# Altium integrated library Brian_Pari.IntLib: 123 symbols (part 2 of 4)
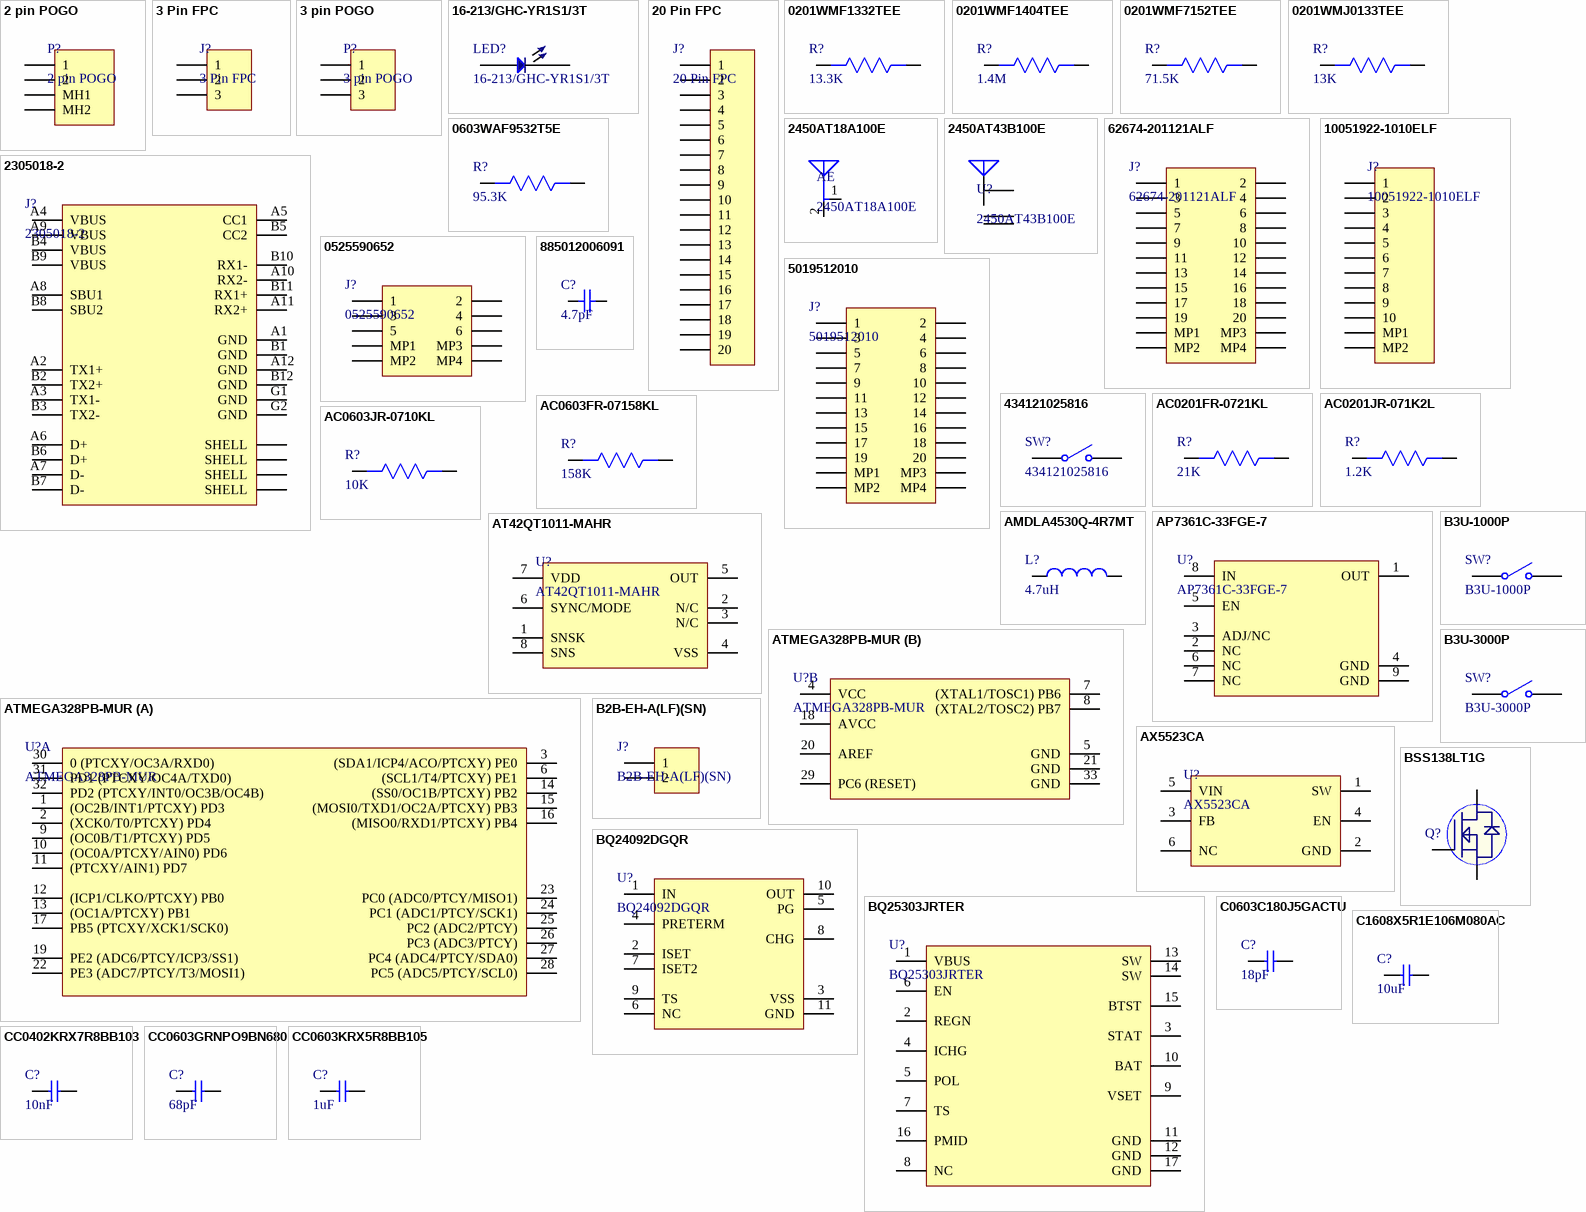
[diagram p4: symbols 2 pin POGO to CC0603KRX5R8BB105]

## CC0603GRNPO9BN680
designator C?, comment 68pF
CAP CER 68PF 50V NPO 0603; Manufacturer: Yageo; Manufacturer Part Number: CC0603GRNPO9BN680; Tolerance: 2%; Dielectric: C0G; Dissipation Factor: 0.1%; Supplier 1: Digi-Key; RoHS: Yes; Category: Ceramic Capacitors; Stock 1: 2385; Pricing 1: 1=0.13000, 10=0.09200, 50=0.05220, 100=0.04320, 500=0.03030, 1000=0.02509 (USD); Mount: Surface Mount; Case/Package: 0603; Case Code (Imperial): 0603; Case Code (Metric): 1608; Min Operating Temperature: -55°C; Max Operating Temperature: 125°C; Capacitance: 68pF; Voltage Rating: 50V; Packaging: Tape and Reel; Voltage Rating (DC): 50V; Termination: SMD/SMT; Resistor Type: Ceramic; Series: CC; Length: 1.6mm; Width: 0.8mm; Height: 0.8mm; Thickness: 0.035inch; Depth: 0.8mm; Radiation Hardening: No; Lead Free: Lead Free; RoHS Compliant: Yes; ComponentLink1URL: https://datasheet.ciiva.com/16623/upy-gp-np0-16v-to-50v-8-16623957.pdf?src-supplier=Avnet+Europe; ComponentLink1Description: https://datasheet.ciiva.com/16623/upy-gp-np0-16v-to-50v-8-16623957.pdf?src-supplier=Avnet+Europe; ComponentLink2URL: https://datasheet.ciiva.com/5427/upy-gp-np0-16v-to-50v-8-5427702.pdf?src-supplier=Mouser; ComponentLink2Description: https://datasheet.ciiva.com/5427/upy-gp-np0-16v-to-50v-8-5427702.pdf?src-supplier=Mouser; ComponentLink3URL: https://datasheet.ciiva.com/11587/upy-gp-np0-16v-to-50v-8-11587318.pdf?src-supplier=Avnet; ComponentLink3Description: https://datasheet.ciiva.com/11587/upy-gp-np0-16v-to-50v-8-11587318.pdf?src-supplier=Avnet; Supplier Part Number 1: 311-3938-1-ND
footprint Cap0603
pins: 1, 2

## CC0603KRX5R8BB105
designator C?, comment 1uF
CAP CER 1UF 25V X5R 0603; Manufacturer: Yageo; Manufacturer Part Number: CC0603KRX5R8BB105; Tolerance: 10%; Supplier 1: Digi-Key; Stock 1: 459947; Pricing 1: 1=0.1, 10=0.076, 100=0.0337, 500=0.0241, 1000=0.01894 (USD); Mount: Surface Mount; Case/Package: 0603; Number of Pins: 2; Case Code (Metric): 1608; Case Code (Imperial): 0603; Min Operating Temperature: -55°C; Max Operating Temperature: 85°C; Capacitance: 1uF; Dielectric: X5R; Package Quantity: 1; Voltage Rating: 25V; Packaging: Tape and Reel; Termination: SMD/SMT; Voltage Rating (DC): 25V; Length: 1.6mm; Height: 0.8mm; Width: 0.031inch; Thickness: 0.035inch; Depth: 0.8mm; Radiation Hardening: No; REACH SVHC: No SVHC; Lead Free: Lead Free; Halogen Free: Halogen Free; ComponentLink1URL: http://www.yageo.com/documents/recent/UPY-GPHC_X5R_4V-to-50V_25.pdf?src-supplier=Digi-Key; ComponentLink1Description: http://www.yageo.com/documents/recent/UPY-GPHC_X5R_4V-to-50V_25.pdf?src-supplier=Digi-Key; ComponentLink2URL: http://www.yageo.com/documents/recent/UPY-GPHC_X5R_4V-to-50V_12.pdf?src-supplier=Avnet+Europe; ComponentLink2Description: http://www.yageo.com/documents/recent/UPY-GPHC_X5R_4V-to-50V_12.pdf?src-supplier=Avnet+Europe; ComponentLink3URL: http://www.farnell.com/datasheets/1525783.pdf?src-supplier=Element14; ComponentLink3Description: http://www.farnell.com/datasheets/1525783.pdf?src-supplier=Element14; ComponentLink4URL: http://www.yageo.com/documents/recent/UPY-GPHC_X5R_4V-to-50V_12.pdf?src-supplier=Avnet; ComponentLink4Description: http://www.yageo.com/documents/recent/UPY-GPHC_X5R_4V-to-50V_12.pdf?src-supplier=Avnet; Supplier Part Number 1: 311-1445-1-ND
footprint Cap0603
pins: 1, 2

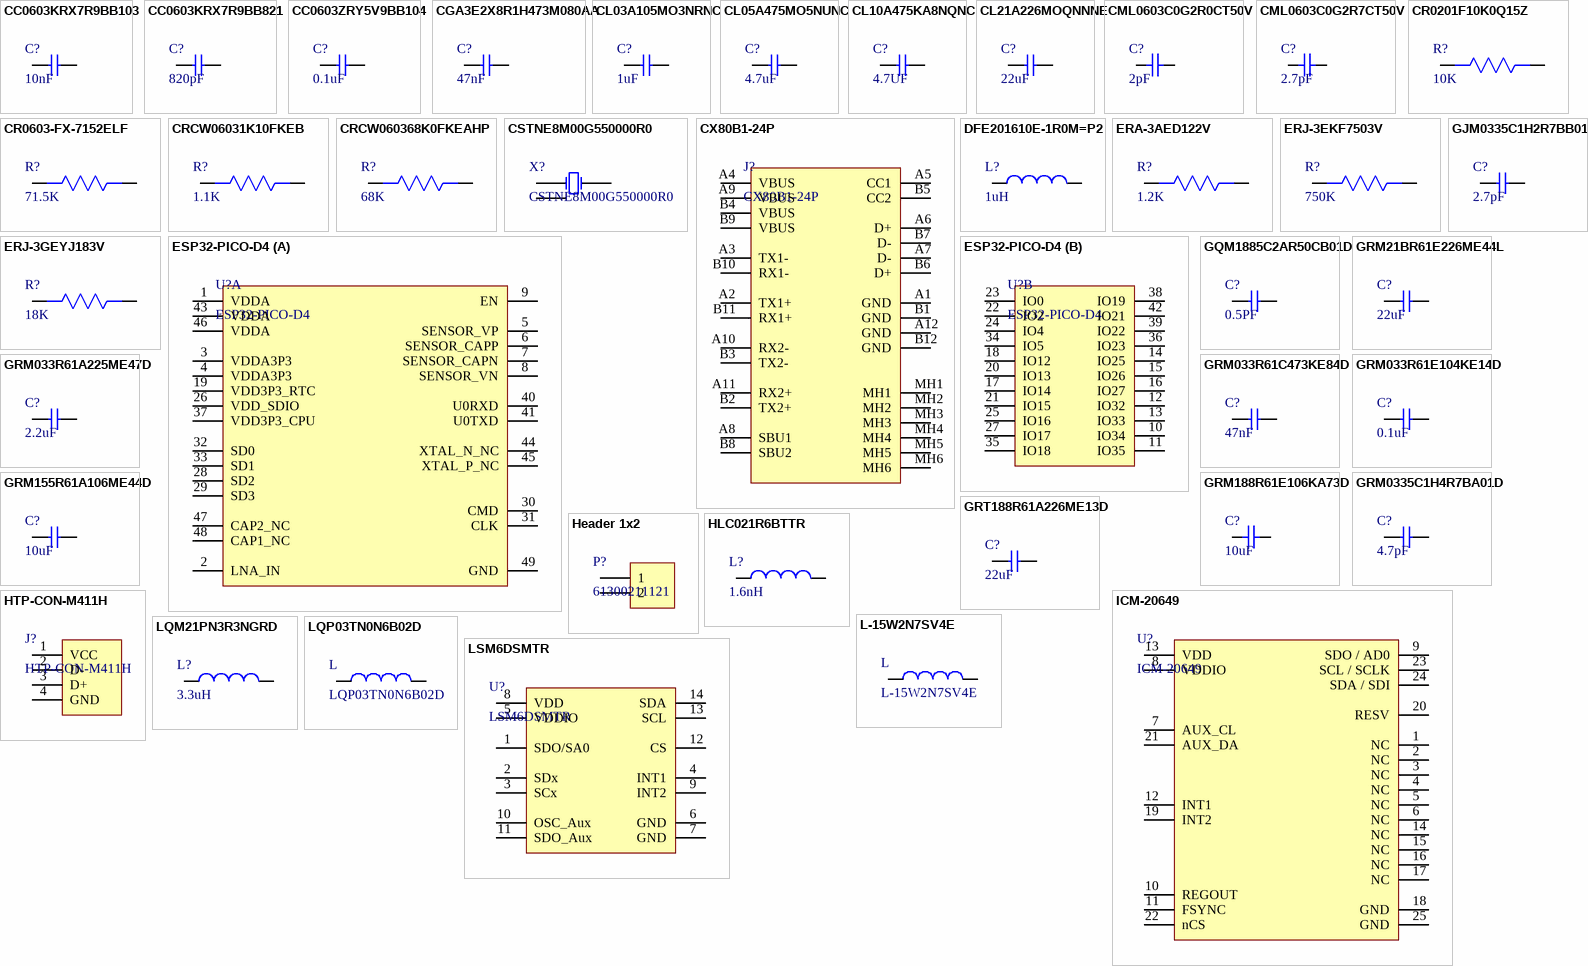
[diagram p1: symbols CC0603KRX7R9BB103 to LSM6DSMTR]

## CC0603KRX7R9BB103
designator C?, comment 10nF
CAP CER 10000PF 50V X7R 0603; Manufacturer: Yageo; Manufacturer Part Number: CC0603KRX7R9BB103; Material: Ceramic; Tolerance: 10%; Insulation Resistance: 100GR; Supplier 1: Digi-Key; Stock 1: 3223922; Pricing 1: 1=0.1, 10=0.041, 100=0.0181, 500=0.01294, 1000=0.01016 (USD); Mount: Surface Mount; Case/Package: 0603; Number of Pins: 2; Case Code (Metric): 1608; Case Code (Imperial): 0603; Min Operating Temperature: -55°C; Max Operating Temperature: 125°C; Capacitance: 10nF; Dielectric: X7R; Voltage: 50V; Packaging: Tape and Reel; Voltage Rating: 50V; Voltage Rating (DC): 50V; Package Quantity: 1; Termination: SMD/SMT; Composition: Ceramic; Length: 1.6mm; Height: 0.8mm; Width: 0.031inch; Thickness: 0.035inch; Depth: 0.8mm; Radiation Hardening: No; REACH SVHC: No SVHC; Lead Free: Lead Free; Halogen Free: Halogen Free; ComponentLink1URL: http://www.farnell.com/datasheets/2167236.pdf?src-supplier=Element14; ComponentLink1Description: http://www.farnell.com/datasheets/2167236.pdf?src-supplier=Element14; ComponentLink2URL: http://www.yageo.com/documents/recent/UPY-GPHC_X7R_6.3V-to-50V_18.pdf?src-supplier=Digi-Key; ComponentLink2Description: http://www.yageo.com/documents/recent/UPY-GPHC_X7R_6.3V-to-50V_18.pdf?src-supplier=Digi-Key; ComponentLink3URL: http://www.farnell.com/datasheets/2167236.pdf?src-supplier=Mouser; ComponentLink3Description: http://www.farnell.com/datasheets/2167236.pdf?src-supplier=Mouser; ComponentLink4URL: http://www.farnell.com/datasheets/70765.pdf?src-supplier=Element14; ComponentLink4Description: http://www.farnell.com/datasheets/70765.pdf?src-supplier=Element14; ComponentLink5URL: http://www.yageo.com/documents/recent/UPY-GPHC_X7R_6.3V-to-50V_8.pdf?src-supplier=Avnet+Europe; ComponentLink5Description: http://www.yageo.com/documents/recent/UPY-GPHC_X7R_6.3V-to-50V_8.pdf?src-supplier=Avnet+Europe; ComponentLink6URL: http://www.farnell.com/datasheets/1489800.pdf?src-supplier=Element14; ComponentLink6Description: http://www.farnell.com/datasheets/1489800.pdf?src-supplier=Element14; ComponentLink7URL: https://www.verical.com/server-webapp/html/getDatasheet?partID=403582&src-supplier=Verical; ComponentLink7Description: https://www.verical.com/server-webapp/html/getDatasheet?partID=403582&src-supplier=Verical; Supplier Part Number 1: 311-1085-1-ND
footprint Cap0603
pins: 1, 2

## CC0603KRX7R9BB821
designator C?, comment 820pF
CAP CER 820PF 50V X7R 0603; Manufacturer: Yageo; Manufacturer Part Number: CC0603KRX7R9BB821; Dielectric Material: Ceramic; Tolerance: 10%; Insulation Resistance: 10GR; Dissipation Factor: 2.5%; Supplier 1: Digi-Key; RoHS: Yes; Category: Ceramic Capacitors; Stock 1: 3528; Pricing 1: 1=0.10000, 10=0.04900, 50=0.02680, 100=0.02190, 500=0.01566, 1000=0.01230 (USD); Mount: Surface Mount; Case/Package: 0603; Case Code (Metric): 1608; Case Code (Imperial): 0603; Min Operating Temperature: -55°C; Max Operating Temperature: 125°C; Capacitance: 820pF; Dielectric: X7R; Packaging: Tape and Reel; Package Quantity: 1; Voltage Rating: 50V; Voltage Rating (DC): 50V; Termination: SMD/SMT; Resistor Type: Ceramic; Voltage: 50V; Series: CC; Construction: Flat; Length: 1.6mm; Width: 0.031inch; Height: 0.8mm; Thickness: 0.035inch; Depth: 0.8mm; Radiation Hardening: No; REACH SVHC: Unknown; Lead Free: Lead Free; Halogen Free: Halogen Free; RoHS Compliant: Yes; ComponentLink1URL: https://datasheet.ciiva.com/26862/getdatasheetpartid-315913-26862865.pdf?src-supplier=Verical; ComponentLink1Description: https://datasheet.ciiva.com/26862/getdatasheetpartid-315913-26862865.pdf?src-supplier=Verical; ComponentLink2URL: https://datasheet.ciiva.com/160/mlccorderingcode-160723.pdf?src-supplier=Digi-Key; ComponentLink2Description: https://datasheet.ciiva.com/160/mlccorderingcode-160723.pdf?src-supplier=Digi-Key; ComponentLink3URL: https://datasheet.ciiva.com/160/mlccorderingcode-160724.pdf?src-supplier=Digi-Key; ComponentLink3Description: https://datasheet.ciiva.com/160/mlccorderingcode-160724.pdf?src-supplier=Digi-Key; ComponentLink4URL: https://datasheet.ciiva.com/160/mlccorderingcode-160725.pdf?src-supplier=Digi-Key; ComponentLink4Description: https://datasheet.ciiva.com/160/mlccorderingcode-160725.pdf?src-supplier=Digi-Key; ComponentLink5URL: https://datasheet.ciiva.com/11465/upy-gphc-x7r-6-3v-to-50v-8-11465274.pdf?src-supplier=Avnet; ComponentLink5Description: https://datasheet.ciiva.com/11465/upy-gphc-x7r-6-3v-to-50v-8-11465274.pdf?src-supplier=Avnet; ComponentLink6URL: https://datasheet.ciiva.com/8033/1489800-8033883.pdf?src-supplier=Element14; ComponentLink6Description: https://datasheet.ciiva.com/8033/1489800-8033883.pdf?src-supplier=Element14; ComponentLink7URL: https://datasheet.ciiva.com/17434/upy-gphc-x7r-6-3v-to-50v-8-17434491.pdf?src-supplier=Avnet+Europe; ComponentLink7Description: https://datasheet.ciiva.com/17434/upy-gphc-x7r-6-3v-to-50v-8-17434491.pdf?src-supplier=Avnet+Europe; ComponentLink8URL: https://datasheet.ciiva.com/13210/upy-gphc-x7r-6-3v-to-50v-8-12304-13210396.pdf?src-supplier=Mouser; ComponentLink8Description: https://datasheet.ciiva.com/13210/upy-gphc-x7r-6-3v-to-50v-8-12304-13210396.pdf?src-supplier=Mouser; ComponentLink9URL: https://datasheet.ciiva.com/8033/1489800-8033885.pdf?src-supplier=Element14; ComponentLink9Description: https://datasheet.ciiva.com/8033/1489800-8033885.pdf?src-supplier=Element14; Supplier Part Number 1: 311-1189-1-ND
footprint Cap0603
pins: 1, 2

## CC0603ZRY5V9BB104
designator C?, comment 0.1uF
CAP CER 0.1UF 50V Y5V 0603; Manufacturer: Yageo; Manufacturer Part Number: CC0603ZRY5V9BB104; Capacitance: 100nF; Tolerance: 80%; Supplier 1: Digi-Key; Stock 1: 1807420; Pricing 1: 1=0.1, 10=0.075, 100=0.0334, 500=0.02386, 1000=0.01874 (USD); Mount: Surface Mount; Case/Package: 0603; Number of Pins: 2; Case Code (Metric): 1608; Case Code (Imperial): 0603; Min Operating Temperature: -30°C; Max Operating Temperature: 85°C; Dielectric: Y5V; Voltage Rating: 50V; Package Quantity: 1; Packaging: Tape and Reel; Voltage Rating (DC): 50V; Termination: SMD/SMT; Composition: Ceramic; Voltage: 50V; Length: 1.6mm; Height: 0.8mm; Width: 0.031inch; Thickness: 0.035inch; Depth: 0.8mm; Radiation Hardening: No; REACH SVHC: No SVHC; Lead Free: Lead Free; Halogen Free: Halogen Free; ComponentLink1URL: http://www.yageo.com/documents/recent/UPY-GPHC_Y5V_6.3V-to-50V_8.pdf; ComponentLink1Description: http://www.yageo.com/documents/recent/UPY-GPHC_Y5V_6.3V-to-50V_8.pdf; ComponentLink2URL: http://www.yageo.com/documents/recent/UPY-GPHC_Y5V_6.3V-to-50V_5.pdf; ComponentLink2Description: http://www.yageo.com/documents/recent/UPY-GPHC_Y5V_6.3V-to-50V_5.pdf; ComponentLink3URL: https://www.verical.com/server-webapp/html/getDatasheet?partID=403611; ComponentLink3Description: https://www.verical.com/server-webapp/html/getDatasheet?partID=403611; ComponentLink4URL: http://www.mouser.com/ds/2/447/Yageo_UPY-GP_NP0_16V-to-50V_9-358835.pdf; ComponentLink4Description: http://www.mouser.com/ds/2/447/Yageo_UPY-GP_NP0_16V-to-50V_9-358835.pdf; ComponentLink5URL: http://www.farnell.com/datasheets/1132289.pdf; ComponentLink5Description: http://www.farnell.com/datasheets/1132289.pdf; Supplier Part Number 1: 311-1343-1-ND
footprint Cap0603
pins: 1, 2

## CGA3E2X8R1H473M080AA
designator C?, comment 47nF
CAP CER 0.047UF 50V X8R 0603; Manufacturer: TDK; Manufacturer Part Number: CGA3E2X8R1H473M080AA; Tolerance: 20%; Supplier 1: Digi-Key; RoHS: Yes; Category: Ceramic Capacitors; Stock 1: 1279; Pricing 1: 1=0.16000, 10=0.11200, 50=0.06360, 100=0.05260, 500=0.03690, 1000=0.03055 (USD); Mount: Surface Mount; Case/Package: 0603; Case Code (Metric): 1608; Weight: 7.1E-05oz; Case Code (Imperial): 0603; Min Operating Temperature: -55°C; Max Operating Temperature: 150°C; Dielectric: X8R; Voltage Rating (DC): 50V; Package Quantity: 4000; Packaging: Tape and Reel; Capacitance: 47nF; Voltage Rating: 50V; Features: High Temperature; Length: 0.063inch; Width: 0.031inch; Height: 0.8mm; Thickness: 0.035inch; Ratings: AEC-Q200; ComponentLink1URL: http://www.mouser.com/ds/2/400/mlcc_automotive_hightemp_en-520039.pdf?src-supplier=Mouser; ComponentLink1Description: http://www.mouser.com/ds/2/400/mlcc_automotive_hightemp_en-520039.pdf?src-supplier=Mouser; ComponentLink2URL: https://product.tdk.com/info/en/catalog/spec/mlccspec_automotive_hightemp_en.pdf?src-supplier=Digi-Key; ComponentLink2Description: https://product.tdk.com/info/en/catalog/spec/mlccspec_automotive_hightemp_en.pdf?src-supplier=Digi-Key; ComponentLink3URL: http://product.tdk.com/en/catalog/datasheets/mlcc_automotive_hightemp_en.pdf?src-supplier=Avnet; ComponentLink3Description: http://product.tdk.com/en/catalog/datasheets/mlcc_automotive_hightemp_en.pdf?src-supplier=Avnet; Supplier Part Number 1: 445-12603-1-ND
footprint Cap0603
pins: 1, 2

## CL03A105MO3NRNC
designator C?, comment 1uF
1µF ±20% 16V Ceramic Capacitor X5R 0201 (0603 Metric) /; Manufacturer: Samsung; Manufacturer Part Number: CL03A105MO3NRNC; Supplier 1: Avnet; RoHS: Yes; Category: Ceramic Capacitors; Pricing 1: 100000=0.02840, 120000=0.02800, 220000=0.02720, 500000=0.02660, 1000000=0.02560, 5000000=0.02500, 10000000=0.02440 (USD); RoHS Compliant: Yes; Supplier Part Number 1: CL03A105MO3NRNC
footprint CAP 0201
pins: 1, 2

## CL05A475MO5NUNC
designator C?, comment 4.7uF
Cap Ceramic 4.7uF 16V X5R 20% SMD 0402 85C T/R; Manufacturer: Samsung; Manufacturer Part Number: CL05A475MO5NUNC; Supplier 1: Avnet; RoHS: Yes; Category: Ceramic Capacitors; Pricing 1: 1=0.63800, 25=0.44600, 100=0.26800, 250=0.23400, 500=0.20000, 1000=0.16900 (USD); Mount: Surface Mount; Case/Package: 0402; Case Code (Metric): 1005; Case Code (Imperial): 0402; Min Operating Temperature: -55°C; Max Operating Temperature: 85°C; Packaging: Tape and Reel; Capacitance: 4.7uF; Voltage Rating: 16V; Tolerance: 20%; Length: 0.039inch; Width: 0.02inch; Thickness: 0.022inch; RoHS Compliant: Yes; ComponentLink1URL: http://www.farnell.com/datasheets/2710653.pdf?src-supplier=Farnell; ComponentLink1Description: http://www.farnell.com/datasheets/2710653.pdf?src-supplier=Farnell; ComponentLink2URL: http://www.farnell.com/datasheets/2710653.pdf?src-supplier=Newark; ComponentLink2Description: http://www.farnell.com/datasheets/2710653.pdf?src-supplier=Newark; ComponentLink3URL: http://www.samsungsem.com/kr/support/product-search/mlcc/CL05A475MO5NUNC.jsp?src-supplier=Digi-Key; ComponentLink3Description: http://www.samsungsem.com/kr/support/product-search/mlcc/CL05A475MO5NUNC.jsp?src-supplier=Digi-Key; Supplier Part Number 1: 82AC9197
footprint Cap 0402
pins: 1, 2

## CL10A475KA8NQNC
designator C?, comment 4.7UF
CAP CER 4.7UF 25V X5R 0603; Manufacturer: Samsung; Manufacturer Part Number: CL10A475KA8NQNC; Tolerance: 10%; Supplier 1: Digi-Key; Stock 1: 2252340; Pricing 1: 1=0.37, 10=0.255, 100=0.1528, 500=0.11456, 1000=0.09675 (USD); Mount: Surface Mount; Case/Package: 0603; Case Code (Metric): 1608; Case Code (Imperial): 0603; Contact Plating: Tin; Min Operating Temperature: -55°C; Max Operating Temperature: 85°C; Package Quantity: 1; Packaging: Tape and Reel; Capacitance: 4.7uF; Voltage Rating: 25V; Dielectric: X5R; Termination: Wraparound; Length: 1.6mm; Width: 0.031inch; Thickness: 0.035inch; Depth: 0.8mm; Lead Free: Lead Free; ComponentLink1URL: http://www.samsungsem.com/kr/support/product-search/mlcc/CL10A475KA8NQNC.jsp?src-supplier=Digi-Key; ComponentLink1Description: http://www.samsungsem.com/kr/support/product-search/mlcc/CL10A475KA8NQNC.jsp?src-supplier=Digi-Key; Supplier Part Number 1: 1276-1900-1-ND
footprint Cap0603
pins: 1, 2

## CL21A226MOQNNNE
designator C?, comment 22uF
CAP CER 22UF 16V X5R 0805; Manufacturer: Samsung; Manufacturer Part Number: CL21A226MOQNNNE; Tolerance: 20%; Supplier 1: Digi-Key; RoHS: Yes; Category: Ceramic Capacitors; Stock 1: 91301; Pricing 1: 1=0.30000, 10=0.20900, 50=0.13900, 100=0.11820, 500=0.08344, 1000=0.07301 (USD); Mount: Surface Mount; Case/Package: 0805; Case Code (Metric): 2012; Case Code (Imperial): 0805; Contact Plating: Tin; Min Operating Temperature: -55°C; Max Operating Temperature: 85°C; Package Quantity: 1; Packaging: Cut Tape; Capacitance: 22uF; Voltage Rating: 16V; Dielectric: X5R; Voltage Rating (DC): 16V; Termination: Wraparound; Series: CL; Construction: Flat; Length: 0.079inch; Width: 0.049inch; Thickness: 0.055inch; RoHS Compliant: Yes; Lead Free: Lead Free; ComponentLink1URL: https://datasheet.ciiva.com/25724/cl21a226moqnnne-25724832.pdf?src-supplier=Digi-Key; ComponentLink1Description: https://datasheet.ciiva.com/25724/cl21a226moqnnne-25724832.pdf?src-supplier=Digi-Key; Supplier Part Number 1: 1276-2909-1-ND
footprint Cap0805 (SMD 0805)
pins: 1, 2

## CML0603C0G2R0CT50V
designator C?, comment 2pF
CAP CER 2PF 50V C0G/NP0 0603; Manufacturer: Stackpole Electronics; Manufacturer Part Number: CML0603C0G2R0CT50V; Supplier 1: Digi-Key; Stock 1: 6378; Pricing 1: 1=0.1, 10=0.061, 50=0.0332, 100=0.027, 500=0.0193, 1000=0.0152 (USD); ComponentLink1URL: http://datasheet.octopart.com/CML0603C0G2R0CT50V-Stackpole-Electronics-datasheet-141158289.pdf?src-supplier=Stackpole+Electronics; ComponentLink1Description: http://datasheet.octopart.com/CML0603C0G2R0CT50V-Stackpole-Electronics-datasheet-141158289.pdf?src-supplier=Stackpole+Electronics; Supplier Part Number 1: 738-CML0603C0G2R0CT50VCT-ND
footprint Cap0603
pins: 1, 2

## CML0603C0G2R7CT50V
designator C?, comment 2.7pF
CAP CER 2.7PF 50V C0G/NP0 0603; Manufacturer: Stackpole Electronics; Manufacturer Part Number: CML0603C0G2R7CT50V; Supplier 1: Digi-Key; Stock 1: 7780; Pricing 1: 1=0.1, 10=0.061, 50=0.0332, 100=0.027, 500=0.0193, 1000=0.0152 (USD); ComponentLink1URL: http://datasheet.octopart.com/CML0603C0G2R7CT50V-Stackpole-Electronics-datasheet-141158289.pdf?src-supplier=Stackpole+Electronics; ComponentLink1Description: http://datasheet.octopart.com/CML0603C0G2R7CT50V-Stackpole-Electronics-datasheet-141158289.pdf?src-supplier=Stackpole+Electronics; Supplier Part Number 1: 738-CML0603C0G2R7CT50VCT-ND
footprint Cap0603
pins: 1, 2

## CR0201F10K0Q15Z
designator R?, comment 10K
10kΩ ±1% 1/20W ±200ppm/℃ 0201 Chip Resistor - Surface Mount RoHS; Manufacturer: Ever Ohms Tech; Manufacturer Part no: CR0201F10K0Q15Z; Package: 0201; Resistance: 10kΩ; Tolerance: ±1%; Power(Watts): 1/20W; Temperature Coefficient: ±200ppm/℃
footprint Res-0201
pins: 1, 2

## CR0603-FX-7152ELF
designator R?, comment 71.5K
71.5kΩ ±1% 0.1W ±100ppm/℃ 0603 Chip Resistor - Surface Mount RoHS; Manufacturer: BOURNS; Manufacturer Part No: CR0603-FX-7152ELF; Package: 0603; Value: 71.5K
footprint Res0603
pins: 1, 2

## CRCW06031K10FKEB
designator R?, comment 1.1K
RES SMD 1.1K OHM 1% 1/10W 0603; Manufacturer: Vishay Dale; Manufacturer Part Number: CRCW06031K10FKEB; Resistance: 1.1kR; Power Rating: 100mW; Voltage Rating: 75V; Temperature Coefficient: 100ppm/°C; Supplier 1: Digi-Key; RoHS: Yes; Category: Chip SMD Resistors; Stock 1: 16383; Pricing 1: 1=0.10000, 10=0.03600, 100=0.01450, 1000=0.00652, 2500=0.00566, 5000=0.00468 (USD); Case/Package: 0603; Weight: 7.1E-05oz; Case Code (Imperial): 0603; Case Code (Metric): 1608; Contact Plating: Tin; Min Operating Temperature: -55°C; Max Operating Temperature: 155°C; Packaging: Tape and Reel; Tolerance: 1%; Package Quantity: 10000; Resistor Type: Thick Film; Number of Terminations: 2; Max Power Dissipation: 100mW; Features: Automotive AEC-Q200; Series: CRCW; Length: 0.061inch; Width: 0.85mm; Height: 0.02inch; Radiation Hardening: No; Lead Free: Lead Free; RoHS Compliant: Yes; ComponentLink1URL: https://datasheet.ciiva.com/9107/dcrcwe3-9107515.pdf?src-supplier=Avnet; ComponentLink1Description: https://datasheet.ciiva.com/9107/dcrcwe3-9107515.pdf?src-supplier=Avnet; ComponentLink2URL: https://datasheet.ciiva.com/5562/dcrcwe3-109170-5562462.pdf?src-supplier=Mouser; ComponentLink2Description: https://datasheet.ciiva.com/5562/dcrcwe3-109170-5562462.pdf?src-supplier=Mouser; Supplier Part Number 1: 541-CRCW06031K10FKEBCT-ND
footprint Res0603
pins: 1, 2

## CRCW060368K0FKEAHP
designator R?, comment 68K
RES SMD 68K OHM 1% 1/3W 0603; Manufacturer: Vishay; Manufacturer Part Number: CRCW060368K0FKEAHP; Resistance: 68kR; Power Rating: 250mW; Voltage Rating: 75V; Temperature Coefficient: 100ppm/°C; Supplier 1: Digi-Key; RoHS: Yes; Category: Chip SMD Resistors; Stock 1: 4004; Pricing 1: 1=0.17000, 10=0.14800, 100=0.05790, 1000=0.02422, 2500=0.02220 (USD); Mount: Surface Mount; Case/Package: 0603; Case Code (Metric): 1608; Case Code (Imperial): 0603; Contact Plating: Tin; Min Operating Temperature: -55°C; Max Operating Temperature: 155°C; Tolerance: 1%; Packaging: Cut Tape; Package Quantity: 1; Resistor Type: Thick Film; Number of Terminations: 2; Max Power Dissipation: 250mW; Termination: Wraparound; Features: Automotive AEC-Q200; Series: CRCW-HP - Automotive; Resistance Tolerance: 1%; Length: 0.063inch; Width: 0.033inch; Height: 0.022inch; REACH SVHC: Unknown; RoHS Compliant: Yes; ComponentLink1URL: https://datasheet.ciiva.com/6551/crcwhpe3-6551637.pdf?src-supplier=Digi-Key; ComponentLink1Description: https://datasheet.ciiva.com/6551/crcwhpe3-6551637.pdf?src-supplier=Digi-Key; ComponentLink2URL: https://datasheet.ciiva.com/6551/crcwhpe3-6551639.pdf?src-supplier=Digi-Key; ComponentLink2Description: https://datasheet.ciiva.com/6551/crcwhpe3-6551639.pdf?src-supplier=Digi-Key; ComponentLink3URL: https://datasheet.ciiva.com/48525/crcwhpe3-48525769.pdf?src-supplier=Avnet; ComponentLink3Description: https://datasheet.ciiva.com/48525/crcwhpe3-48525769.pdf?src-supplier=Avnet; ComponentLink4URL: https://datasheet.ciiva.com/6551/crcwhpe3-6551642.pdf?src-supplier=Digi-Key; ComponentLink4Description: https://datasheet.ciiva.com/6551/crcwhpe3-6551642.pdf?src-supplier=Digi-Key; ComponentLink5URL: https://datasheet.ciiva.com/7672/1885357-7672924.pdf?src-supplier=Element14; ComponentLink5Description: https://datasheet.ciiva.com/7672/1885357-7672924.pdf?src-supplier=Element14; ComponentLink6URL: https://datasheet.ciiva.com/7672/1885357-7672925.pdf?src-supplier=Element14; ComponentLink6Description: https://datasheet.ciiva.com/7672/1885357-7672925.pdf?src-supplier=Element14; Supplier Part Number 1: 541-68.0KSCT-ND
footprint Res0603
pins: 1, 2

## CSTNE8M00G550000R0
designator X?
CERAMIC RES 8.0000MHZ 33PF SMD; Manufacturer: Murata; Frequency: 8MHz; Frequency Stability: 0.2%; Frequency Tolerance: 0.5%; Impedance: 40R; Supplier 1: Digi-Key; Manufacturer Part Number: CSTNE8M00G550000R0; RoHS: Yes; Category: Resonators; Stock 1: 147911; Pricing 1: 1=0.25000, 10=0.21200, 50=0.19040, 100=0.16920, 500=0.16074, 1000=0.13536 (USD); Mount: Surface Mount; Case/Package: SMD/SMT; Min Operating Temperature: -40°C; Max Operating Temperature: 85°C; Resistor Type: Ceramic; Packaging: Tape and Reel; Capacitance: 33pF; RoHS Compliant: Yes; ComponentLink1URL: https://www.murata.com/en/products/productdata/8801161740318/SPEC-CSTNE8M00G550000R0.pdf?src-supplier=Digi-Key; ComponentLink1Description: https://www.murata.com/en/products/productdata/8801161740318/SPEC-CSTNE8M00G550000R0.pdf?src-supplier=Digi-Key; Supplier Part Number 1: 490-17958-1-ND
footprint CSTNE8M00G550000R0
pins: 1 In/Out, 2 GND , 3 Out/In

## CX80B1-24P
designator J?
CONN RCPT USB3.1 TYPE C SMT VERT; Manufacturer: Hirose; Connector Type: USB; Number of Contacts: 24; Gender: Receptacle; Number of Ports: 1; Current Rating: 1.25A; Mating Cycles: 10000; Shielding: Shielded; Supplier 1: Digi-Key; Manufacturer Part Number: CX80B1-24P; RoHS: Yes; Category: Connectors; Stock 1: 1; Pricing 1: 1=3.23000, 10=3.09600, 25=2.83800, 50=2.70900, 100=2.58000, 250=2.25752 (USD); Mount: Surface Mount,Through Hole; Contact Plating: Gold; Insulation Color: Black; Min Operating Temperature: -40°C; Max Operating Temperature: 85°C; Packaging: Cut Tape; Termination: Solder; Flammability Rating: UL94 V-0; ComponentLink1URL: https://www.hirose.com/product/download/?distributor=digikey&amp;type=2d&amp;lang=en&amp;num=CX80B1-24P&src-supplier=Digi-Key; ComponentLink1Description: https://www.hirose.com/product/download/?distributor=digikey&amp;type=2d&amp;lang=en&amp;num=CX80B1-24P&src-supplier=Digi-Key; Supplier Part Number 1: 26-CX80B1-24PCT-ND
footprint CX80B1-24P
pins: A1 GND, A2 TX1+, A3 TX1-, A4 VBUS , A5 CC1, A6 D+, A7 D-, A8 SBU1, A9 VBUS, A10 RX2-, A11 RX2+, A12 GND, B1 GND, B2 TX2+, B3 TX2-, B4 VBUS , B5 CC2, B6 D+, B7 D-, B8 SBU2, B9 VBUS, B10 RX1-, B11 RX1+, B12 GND, MH1, MH2, MH3, MH4, MH5, MH6

## DFE201610E-1R0M=P2
designator L?, comment 1uH
Inductor Power Shielded Wirewound 1uH 20% 1MHz Metal 2.7A 0.057Ohm DCR 0806 T/R; Manufacturer: Murata; Manufacturer Part Number: DFE201610E-1R0M=P2; Supplier 1: Digi-Key; RoHS: Yes; Category: Fixed Inductors; Stock 1: 27; Pricing 1: 1=0.37000, 10=0.32800, 25=0.28680, 50=0.24560, 100=0.22520, 250=0.20476, 500=0.19246, 1000=0.14742 (USD); RoHS Compliant: Yes; ComponentLink1URL: http://www.farnell.com/datasheets/2339713.pdf?src-supplier=Farnell; ComponentLink1Description: http://www.farnell.com/datasheets/2339713.pdf?src-supplier=Farnell; Supplier Part Number 1: 490-18106-1-ND
footprint IND  0806 (1uH ±20% 3.6A 0806 Inductors (SMD) RoHS)
pins: 1, 2

## ERA-3AED122V
designator R?, comment 1.2K
RES SMD 1.2K OHM 0.5% 1/10W 0603; Manufacturer: Panasonic; Manufacturer Part Number: ERA3AED122V; Resistance: 1.2kR; Power Rating: 100mW; Voltage Rating: 150V; Temperature Coefficient: 25ppm/°C; Supplier 1: Digi-Key; RoHS: Yes; Category: Chip SMD Resistors; Stock 1: 20120; Pricing 1: 1=0.10000, 10=0.09400, 25=0.06480, 50=0.05040, 100=0.03600, 250=0.02808, 500=0.02232, 1000=0.01584 (USD); Mount: Surface Mount; Case/Package: 0603; Case Code (Imperial): 0603; Case Code (Metric): 1608; Contact Plating: Tin; Min Operating Temperature: -55°C; Max Operating Temperature: 155°C; Tolerance: 0.5%; Packaging: Tape and Reel; Package Quantity: 5000; Resistor Type: Thin Film; Series: ERA-3A; Length: 1.6mm; Width: 0.8mm; Height: 0.45mm; Lead Free: Lead Free; RoHS Compliant: Yes; ComponentLink1URL: https://datasheet.ciiva.com/9198/aoa0000ce26-9198581.pdf?src-supplier=Avnet; ComponentLink1Description: https://datasheet.ciiva.com/9198/aoa0000ce26-9198581.pdf?src-supplier=Avnet; Supplier Part Number 1: P123738CT-ND
footprint Res0603
pins: 1, 2

## ERJ-3EKF7503V
designator R?, comment 750K
RES SMD 750K OHM 1% 1/10W 0603; Manufacturer: Panasonic; Manufacturer Part Number: ERJ-3EKF7503V; Resistance: 750kR; Power Rating: 100mW; Voltage Rating: 75V; Temperature Coefficient: 100ppm/°C; Voltage Rating (DC): 50V; Supplier 1: Digi-Key; RoHS: Yes; Category: Chip SMD Resistors; Stock 1: 19312; Pricing 1: 1=0.10000, 10=0.03700, 100=0.01490, 1000=0.00670, 2500=0.00582 (USD); Mount: Surface Mount; Case/Package: 0603; Case Code (Metric): 1608; Case Code (Imperial): 0603; Contact Plating: Tin; Min Operating Temperature: -55°C; Max Operating Temperature: 155°C; Packaging: Tape and Reel; Tolerance: 1%; Package Quantity: 1; Resistor Type: Thick Film; Number of Terminations: 2; Termination: SMD/SMT; Max Power Dissipation: 100mW; Features: Automotive AEC-Q200; Series: ERJ; Construction: Rectangular; Resistance Tolerance: 1%; Length: 1.6mm; Width: 0.031inch; Height: 0.022inch; Depth: 0.8mm; Radiation Hardening: No; REACH SVHC: Unknown; Military Standard: Not; Lead Free: Lead Free; RoHS Compliant: Yes; ComponentLink1URL: https://datasheet.ciiva.com/16764/70260748-16764181.pdf?src-supplier=Allied+Electronics; ComponentLink1Description: https://datasheet.ciiva.com/16764/70260748-16764181.pdf?src-supplier=Allied+Electronics; ComponentLink2URL: https://datasheet.ciiva.com/43460/426256-43460645.pdf?src-supplier=Farnell; ComponentLink2Description: https://datasheet.ciiva.com/43460/426256-43460645.pdf?src-supplier=Farnell; ComponentLink3URL: https://datasheet.ciiva.com/9117/aoa0000ce2-9117158.pdf?src-supplier=Avnet; ComponentLink3Description: https://datasheet.ciiva.com/9117/aoa0000ce2-9117158.pdf?src-supplier=Avnet; ComponentLink4URL: https://datasheet.ciiva.com/28688/1678782-28688073.pdf?src-supplier=Element14; ComponentLink4Description: https://datasheet.ciiva.com/28688/1678782-28688073.pdf?src-supplier=Element14; ComponentLink5URL: https://datasheet.ciiva.com/46374/426256-46374090.pdf?src-supplier=Element14; ComponentLink5Description: https://datasheet.ciiva.com/46374/426256-46374090.pdf?src-supplier=Element14; ComponentLink6URL: https://datasheet.ciiva.com/6064/426256-6064571.pdf?src-supplier=Farnell; ComponentLink6Description: https://datasheet.ciiva.com/6064/426256-6064571.pdf?src-supplier=Farnell; ComponentLink7URL: https://datasheet.ciiva.com/30127/aoa0000ce2-30127931.pdf?src-supplier=Onlinecomponents.com; ComponentLink7Description: https://datasheet.ciiva.com/30127/aoa0000ce2-30127931.pdf?src-supplier=Onlinecomponents.com; ComponentLink8URL: https://datasheet.ciiva.com/24069/aoa0000ce2-24069452.pdf?src-supplier=Mouser; ComponentLink8Description: https://datasheet.ciiva.com/24069/aoa0000ce2-24069452.pdf?src-supplier=Mouser; ComponentLink9URL: https://datasheet.ciiva.com/46386/426256-46386877.pdf?src-supplier=Element14; ComponentLink9Description: https://datasheet.ciiva.com/46386/426256-46386877.pdf?src-supplier=Element14; ComponentLink10URL: https://datasheet.ciiva.com/16758/70260748-16758143.pdf?src-supplier=Allied+Electronics; ComponentLink10Description: https://datasheet.ciiva.com/16758/70260748-16758143.pdf?src-supplier=Allied+Electronics; Supplier Part Number 1: P750KHCT-ND
footprint Res0603
pins: 1, 2

## ERJ-3GEYJ183V
designator R?, comment 18K
RES SMD 18K OHM 5% 1/10W 0603; Manufacturer: Panasonic; Manufacturer Part Number: ERJ-3GEYJ183V; Resistance: 18kR; Power Rating: 100mW; Voltage Rating: 75V; Temperature Coefficient: 200ppm/°C; Voltage Rating (DC): 50V; Supplier 1: Digi-Key; RoHS: Yes; Category: Chip SMD Resistors; Stock 1: 113560; Pricing 1: 1=0.10000, 10=0.03300, 100=0.01360, 1000=0.00610, 2500=0.00529 (USD); Mount: Surface Mount; Case/Package: 0603; Case Code (Metric): 1608; Case Code (Imperial): 0603; Contact Plating: Tin; Min Operating Temperature: -55°C; Max Operating Temperature: 155°C; Tolerance: 5%; Packaging: Tape and Reel; Package Quantity: 1; Resistor Type: Thick Film; Number of Terminations: 2; Termination: SMD/SMT; Max Power Dissipation: 100mW; Features: Automotive AEC-Q200; Series: ERJ; Resistance Tolerance: 5%; Construction: Rectangular; Technology: THICK FILM; Length: 1.6mm; Width: 0.031inch; Height: 0.45mm; Depth: 0.8mm; REACH SVHC: No SVHC; Military Standard: Not; Lead Free: Contains Lead; RoHS Compliant: Yes; ComponentLink1URL: https://datasheet.ciiva.com/11821/0900766b80f806dd-11821418.pdf?src-supplier=RSComponents; ComponentLink1Description: https://datasheet.ciiva.com/11821/0900766b80f806dd-11821418.pdf?src-supplier=RSComponents; ComponentLink2URL: https://datasheet.ciiva.com/30227/4aoa0000ce1-30227125.pdf?src-supplier=Onlinecomponents.com; ComponentLink2Description: https://datasheet.ciiva.com/30227/4aoa0000ce1-30227125.pdf?src-supplier=Onlinecomponents.com; ComponentLink3URL: https://datasheet.ciiva.com/46443/1500035-46443766.pdf?src-supplier=Element14; ComponentLink3Description: https://datasheet.ciiva.com/46443/1500035-46443766.pdf?src-supplier=Element14; ComponentLink4URL: https://datasheet.ciiva.com/9192/aoa0000ce1-9192551.pdf?src-supplier=Avnet; ComponentLink4Description: https://datasheet.ciiva.com/9192/aoa0000ce1-9192551.pdf?src-supplier=Avnet; ComponentLink5URL: https://datasheet.ciiva.com/16786/70255313-16786967.pdf?src-supplier=Allied+Electronics; ComponentLink5Description: https://datasheet.ciiva.com/16786/70255313-16786967.pdf?src-supplier=Allied+Electronics; ComponentLink6URL: https://datasheet.ciiva.com/16775/70255313-16775307.pdf?src-supplier=Allied+Electronics; ComponentLink6Description: https://datasheet.ciiva.com/16775/70255313-16775307.pdf?src-supplier=Allied+Electronics; ComponentLink7URL: https://datasheet.ciiva.com/28590/1678796-28590973.pdf?src-supplier=Element14; ComponentLink7Description: https://datasheet.ciiva.com/28590/1678796-28590973.pdf?src-supplier=Element14; Supplier Part Number 1: P18KGCT-ND
footprint Res0603
pins: 1, 2

## ESP32-PICO-D4
designator U?
RX TXRX MOD WIFI SURFACE MOUNT; Manufacturer: Espressif Systems; Frequency: 2.5GHz; Interface: I2C,SPI,GPIO,PWM,SDIO,UART; Data Rate: 150Mbps; Sensitivity: -98.4dBm; Memory Size: 4MB; Supplier 1: Digi-Key; Manufacturer Part Number: ESP32-PICO-D4; Stock 1: 5967; Pricing 1: 1=4.5 (USD); Mount: Surface Mount; Case/Package: SMD/SMT; Min Operating Temperature: -40°C; Max Operating Temperature: 85°C; ComponentLink1URL: https://www.espressif.com/sites/default/files/documentation/esp32-pico-d4_datasheet_en.pdf?src-supplier=Digi-Key; ComponentLink1Description: https://www.espressif.com/sites/default/files/documentation/esp32-pico-d4_datasheet_en.pdf?src-supplier=Digi-Key; Supplier Part Number 1: 1904-1029-1-ND
footprint 48-SMD Module
part A pins: 1 VDDA, 2 LNA_IN, 3 VDDA3P3, 4 VDDA3P3, 5 SENSOR_VP, 6 SENSOR_CAPP, 7 SENSOR_CAPN, 8 SENSOR_VN, 9 EN, 19 VDD3P3_RTC, 26 VDD_SDIO, 28 SD2, 29 SD3, 30 CMD, 31 CLK, 32 SD0, 33 SD1, 37 VDD3P3_CPU, 40 U0RXD, 41 U0TXD, 43 VDDA, 44 XTAL_N_NC, 45 XTAL_P_NC, 46 VDDA, 47 CAP2_NC, 48 CAP1_NC, 49 GND
part B pins: 10 IO34, 11 IO35, 12 IO32, 13 IO33, 14 IO25, 15 IO26, 16 IO27, 17 IO14, 18 IO12, 20 IO13, 21 IO15, 22 IO2, 23 IO0, 24 IO4, 25 IO16, 27 IO17, 34 IO5, 35 IO18, 36 IO23, 38 IO19, 39 IO22, 42 IO21

## GJM0335C1H2R7BB01D
designator C?, comment 2.7pF
Cap Ceramic 2.7pF 50V C0G 0.1pF Pad SMD 0201 125C T/R; Manufacturer: Murata; Manufacturer Part Number: GJM0335C1H2R7BB01D; Supplier 1: Digi-Key; RoHS: Yes; Category: Ceramic Capacitors; Stock 1: 58349; Pricing 1: 1=0.11000, 10=0.08000, 50=0.04360, 100=0.03560, 500=0.02540, 1000=0.01996, 2500=0.01815, 5000=0.01670 (USD); Supplier Part Number 1: 490-17168-1-ND
footprint CAP 0201
pins: 1, 2

## GQM1885C2AR50CB01D
designator C?, comment 0.5PF
CAP CER 0.5PF 100V C0G/NP0 0603; Manufacturer: Murata; Manufacturer Part Number: GQM1885C2AR50CB01D; Tolerance: 5%; Dielectric: C0G; ComponentLink1URL: http://components.arrow.com/part/dataview/0323_06887183?src-supplier=Arrow+Europe; ComponentLink1Description: http://components.arrow.com/part/dataview/0323_06887183?src-supplier=Arrow+Europe; ComponentLink2URL: http://www.farnell.com/datasheets/2792994.pdf?src-supplier=Farnell; ComponentLink2Description: http://www.farnell.com/datasheets/2792994.pdf?src-supplier=Farnell; ComponentLink3URL: http://www.farnell.com/datasheets/2291921.pdf?src-supplier=Avnet; ComponentLink3Description: http://www.farnell.com/datasheets/2291921.pdf?src-supplier=Avnet; ComponentLink4URL: http://www.farnell.com/datasheets/1470445.pdf?src-supplier=Newark; ComponentLink4Description: http://www.farnell.com/datasheets/1470445.pdf?src-supplier=Newark; ComponentLink5URL: http://www.farnell.com/datasheets/2291921.pdf?src-supplier=Newark; ComponentLink5Description: http://www.farnell.com/datasheets/2291921.pdf?src-supplier=Newark; ComponentLink6URL: http://www.farnell.com/datasheets/2792994.pdf?src-supplier=Element14; ComponentLink6Description: http://www.farnell.com/datasheets/2792994.pdf?src-supplier=Element14; ComponentLink7URL: http://www.farnell.com/datasheets/1913358.pdf?src-supplier=Element14; ComponentLink7Description: http://www.farnell.com/datasheets/1913358.pdf?src-supplier=Element14; ComponentLink8URL: https://product.tdk.com/info/en/catalog/datasheets/mlcc_commercial_general_en.pdf?src-supplier=Digi-Key; ComponentLink8Description: https://product.tdk.com/info/en/catalog/datasheets/mlcc_commercial_general_en.pdf?src-supplier=Digi-Key; ComponentLink9URL: http://www.farnell.com/datasheets/2291921.pdf?src-supplier=RSComponents; ComponentLink9Description: http://www.farnell.com/datasheets/2291921.pdf?src-supplier=RSComponents; ComponentLink10URL: http://www.farnell.com/datasheets/2291921.pdf?src-supplier=Verical; ComponentLink10Description: http://www.farnell.com/datasheets/2291921.pdf?src-supplier=Verical; ComponentLink11URL: http://www.farnell.com/datasheets/2291921.pdf?src-supplier=Mouser; ComponentLink11Description: http://www.farnell.com/datasheets/2291921.pdf?src-supplier=Mouser; ComponentLink12URL: http://www.farnell.com/datasheets/2792994.pdf?src-supplier=Newark; ComponentLink12Description: http://www.farnell.com/datasheets/2792994.pdf?src-supplier=Newark; ComponentLink13URL: http://www.farnell.com/datasheets/2291921.pdf?src-supplier=Quest; ComponentLink13Description: http://www.farnell.com/datasheets/2291921.pdf?src-supplier=Quest; ComponentLink14URL: http://www.farnell.com/datasheets/2291921.pdf?src-supplier=TTI; ComponentLink14Description: http://www.farnell.com/datasheets/2291921.pdf?src-supplier=TTI; Supplier 1: Digi-Key; Stock 1: 0; Mount: Surface Mount; Case/Package: 0603; Number of Pins: 2; Case Code (Metric): 1608; Case Code (Imperial): 0603; Min Operating Temperature: -55°C; Max Operating Temperature: 125°C; Package Quantity: 1; Capacitance: 0.5pF; Voltage Rating: 100V; Packaging: Tape and Reel; Termination: SMD/SMT; Voltage: 100V; Voltage Rating (DC): 100V; Series: GQM; Construction: Flat; Length: 1.6mm; Width: 0.031inch; Height: 0.8mm; Thickness: 0.035inch; Depth: 0.8mm; Lead Pitch: 0.5mm; Radiation Hardening: No; REACH SVHC: No SVHC; Lead Free: Lead Free; RoHS Compliant: Yes; ComponentLink15URL: http://search.murata.co.jp/Ceramy/image/img/A01X/partnumbering_e_01.pdf?src-supplier=Digi-Key; ComponentLink15Description: http://search.murata.co.jp/Ceramy/image/img/A01X/partnumbering_e_01.pdf?src-supplier=Digi-Key; ComponentLink16URL: http://search.murata.co.jp/Ceramy/image/img/A01X/G101/ENG/GQM1885C2AR50CB01-01.pdf?src-supplier=Digi-Key; ComponentLink16Description: http://search.murata.co.jp/Ceramy/image/img/A01X/G101/ENG/GQM1885C2AR50CB01-01.pdf?src-supplier=Digi-Key; ComponentLink17URL: http://www.farnell.com/datasheets/1303353.pdf?src-supplier=Farnell; ComponentLink17Description: http://www.farnell.com/datasheets/1303353.pdf?src-supplier=Farnell; ComponentLink18URL: http://www.farnell.com/datasheets/1303353.pdf?src-supplier=Element14; ComponentLink18Description: http://www.farnell.com/datasheets/1303353.pdf?src-supplier=Element14; ComponentLink19URL: http://psearch.murata.com/capacitor/product/GQM1885C2AR50CB01%23.pdf?src-supplier=Avnet; ComponentLink19Description: http://psearch.murata.com/capacitor/product/GQM1885C2AR50CB01%23.pdf?src-supplier=Avnet; ComponentLink20URL: https://www.distrelec.biz/Web/Downloads/_t/ds/murata_MLCC_eng_tds.pdf?mime=application%2Fpdf&src-supplier=Distrelec; ComponentLink20Description: https://www.distrelec.biz/Web/Downloads/_t/ds/murata_MLCC_eng_tds.pdf?mime=application%2Fpdf&src-supplier=Distrelec; ComponentLink21URL: http://www1.futureelectronics.com/doc/MURATA/GQM1885C2AR50CB01D.pdf?src-supplier=Future+Electronics; ComponentLink21Description: http://www1.futureelectronics.com/doc/MURATA/GQM1885C2AR50CB01D.pdf?src-supplier=Future+Electronics; Supplier Part Number 1: 490-3551-2-ND
footprint Cap0603
pins: 1, 2

## GRM21BR61E226ME44L
designator C?, comment 22uF
CAP CER 22UF 25V X5R 0805; Manufacturer: Murata; Manufacturer Part Number: GRM21BR61E226ME44L; Material: Ceramic; Tolerance: 20%; Supplier 1: Digi-Key; Stock 1: 469852; Pricing 1: 1=0.54, 10=0.383, 100=0.2521, 500=0.18672, 1000=0.15871 (USD); Mount: Surface Mount; Case/Package: 0805; Weight: 0.000335oz; Case Code (Metric): 2012; Case Code (Imperial): 0805; Min Operating Temperature: -55°C; Max Operating Temperature: 85°C; Capacitance: 22uF; Voltage Rating: 25V; Packaging: Tape and Reel; Dielectric: X5R; Voltage: 25V; Termination: SMD/SMT; Composition: Ceramic; Voltage Rating (DC): 25V; Package Quantity: 3000; Length: 2mm; Height: 1.25mm; Width: 1.25mm; Thickness: 0.057inch; Depth: 1.25mm; REACH SVHC: No SVHC; Lead Free: Lead Free; ComponentLink1URL: http://www.farnell.com/datasheets/2048737.pdf?src-supplier=Farnell; ComponentLink1Description: http://www.farnell.com/datasheets/2048737.pdf?src-supplier=Farnell; ComponentLink2URL: http://www.farnell.com/datasheets/2048737.pdf?src-supplier=Element14; ComponentLink2Description: http://www.farnell.com/datasheets/2048737.pdf?src-supplier=Element14; Supplier Part Number 1: 490-10749-1-ND
footprint Cap0805 (SMD 0805)
pins: 1, 2

## GRM033R61A225ME47D
designator C?, comment 2.2uF
CAP CER 2.2UF 10V X5R 0201; Manufacturer: Murata; Manufacturer Part Number: GRM033R61A225ME47D; Tolerance: 20%; Supplier 1: Avnet; RoHS: Yes; Category: Ceramic Capacitors; Pricing 1: 15000=0.04772, 30000=0.04483, 60000=0.04193, 90000=0.03904, 120000=0.03615, 150000=0.03495, 1500000=0.03374 (USD); Mount: Surface Mount; Case/Package: 0201; Case Code (Metric): 0603; Case Code (Imperial): 0201; Min Operating Temperature: -55°C; Max Operating Temperature: 85°C; Packaging: Tape and Reel; Capacitance: 2.2uF; Voltage Rating: 10V; Voltage Rating (DC): 10V; Dielectric: X5R; Length: 0.024inch; Width: 0.012inch; Thickness: 0.015inch; RoHS Compliant: Yes; ComponentLink1URL: http://search.murata.co.jp/Ceramy/image/img/A01X/G101/ENG/GRM033R61A225ME47-01.pdf?src-supplier=Digi-Key; ComponentLink1Description: http://search.murata.co.jp/Ceramy/image/img/A01X/G101/ENG/GRM033R61A225ME47-01.pdf?src-supplier=Digi-Key; ComponentLink2URL: https://www.murata.com/~/media/webrenewal/support/library/catalog/products/capacitor/mlcc/c02e.ashx?la=en-us&src-supplier=Digi-Key; ComponentLink2Description: https://www.murata.com/~/media/webrenewal/support/library/catalog/products/capacitor/mlcc/c02e.ashx?la=en-us&src-supplier=Digi-Key; Supplier Part Number 1: GRM033R61A225ME47D
footprint CAP 0201
pins: 1, 2

## GRM033R61C473KE84D
designator C?, comment 47nF
CAP SMD .047uF 16V 0201; Manufacturer: Murata; Manufacturer Part Number: GRM033R61C473KE84D; Tolerance: 10%; Dielectric: X5R; Supplier 1: Digi-Key; RoHS: Yes; Category: Ceramic Capacitors; Stock 1: 292349; Pricing 1: 1=0.10000, 10=0.06800, 50=0.03720, 100=0.03040, 500=0.02174, 1000=0.01708, 2500=0.01552, 5000=0.01428 (USD); Mount: Surface Mount; Case/Package: 0201; Case Code (Metric): 0603; Case Code (Imperial): 0201; Weight: 1.2E-05oz; Min Operating Temperature: -55°C; Max Operating Temperature: 85°C; Package Quantity: 15000; Packaging: Tape and Reel; Capacitance: 47nF; Voltage Rating: 16V; Voltage Rating (DC): 16V; Termination: SMD/SMT; Length: 0.024inch; Width: 0.012inch; Height: 0.3mm; Thickness: 0.013inch; Lead Free: Lead Free; RoHS Compliant: Yes; ComponentLink1URL: https://datasheet.ciiva.com/18699/grm033r61c473ke84-01-18699268.pdf?src-supplier=Digi-Key; ComponentLink1Description: https://datasheet.ciiva.com/18699/grm033r61c473ke84-01-18699268.pdf?src-supplier=Digi-Key; ComponentLink2URL: https://datasheet.ciiva.com/18699/partnumbering-e-01-18699269.pdf?src-supplier=Digi-Key; ComponentLink2Description: https://datasheet.ciiva.com/18699/partnumbering-e-01-18699269.pdf?src-supplier=Digi-Key; ComponentLink3URL: https://datasheet.ciiva.com/24221/c02e-24221301.pdf?src-supplier=Mouser; ComponentLink3Description: https://datasheet.ciiva.com/24221/c02e-24221301.pdf?src-supplier=Mouser; ComponentLink4URL: https://datasheet.ciiva.com/18699/partnumbering-e-01-18699270.pdf?src-supplier=Digi-Key; ComponentLink4Description: https://datasheet.ciiva.com/18699/partnumbering-e-01-18699270.pdf?src-supplier=Digi-Key; Supplier Part Number 1: 490-7227-1-ND
footprint CAP 0201
pins: 1, 2

## GRM033R61E104KE14D
designator C?, comment 0.1uF
CAP CER 0.1UF 25V X5R 0201; Manufacturer: Murata; Manufacturer Part Number: GRM033R61E104KE14D; Capacitance: 100nF; Tolerance: 10%; Supplier 1: Mouser; RoHS: Yes; Category: Ceramic Capacitors; Stock 1: 22478; Pricing 1: 1=0.10000, 10=0.03100, 50=0.03100, 100=0.02500, 1000=0.01700, 10000=0.01400 (USD); Mount: Surface Mount; Case/Package: 0201; Case Code (Metric): 0603; Case Code (Imperial): 0201; Weight: 1.2E-05oz; Min Operating Temperature: -55°C; Max Operating Temperature: 85°C; Packaging: Tape and Reel; Voltage Rating: 25V; Dielectric: X5R; Termination: SMD/SMT; Resistor Type: Ceramic; Voltage Rating (DC): 25V; Package Quantity: 15000; Length: 0.024inch; Width: 0.012inch; Height: 0.3mm; Thickness: 0.013inch; Lead Free: Lead Free; RoHS Compliant: Yes; ComponentLink1URL: http://www.farnell.com/datasheets/2867843.pdf?src-supplier=Farnell; ComponentLink1Description: http://www.farnell.com/datasheets/2867843.pdf?src-supplier=Farnell; ComponentLink2URL: http://www.mouser.com/ds/2/281/c02e-2905.pdf?src-supplier=Mouser; ComponentLink2Description: http://www.mouser.com/ds/2/281/c02e-2905.pdf?src-supplier=Mouser; ComponentLink3URL: http://search.murata.co.jp/Ceramy/image/img/A01X/G101/ENG/GRM033R61E104KE14-01.pdf?src-supplier=Digi-Key; ComponentLink3Description: http://search.murata.co.jp/Ceramy/image/img/A01X/G101/ENG/GRM033R61E104KE14-01.pdf?src-supplier=Digi-Key; ComponentLink4URL: http://www.farnell.com/datasheets/2867843.pdf?src-supplier=Newark; ComponentLink4Description: http://www.farnell.com/datasheets/2867843.pdf?src-supplier=Newark; Supplier Part Number 1: 81-GRM033R61E104KE4D
footprint CAP 0201
pins: 1, 2

## GRM155R61A106ME44D
designator C?, comment 10uF
10uF ±20% 10V X5R 0402 Multilayer Ceramic Capacitors MLCC - SMD/SMT RoHS; Manufacturer: Murata; Manufacturer Part No: GRM155R61A106ME44D; Value: 10uF; Package: 0402
footprint Cap 0402
pins: 1, 2

## GRM188R61E106KA73D
designator C?, comment 10uF
CAP CER 10UF 25V X5R 0603; Manufacturer: Murata; Manufacturer Part Number: GRM188R61E106KA73D; Supplier 1: Mouser; RoHS: Yes; Category: Ceramic Capacitors; Stock 1: 319428; Pricing 1: 1=0.36000, 10=0.25800, 50=0.25800, 100=0.15500, 1000=0.09800, 10000=0.06900 (USD); Case/Package: 0603; RoHS Compliant: Yes; ComponentLink1URL: https://search.murata.co.jp/Ceramy/image/img/A01X/G101/ENG/GRM188R61E106KA73-01.pdf?src-supplier=Digi-Key; ComponentLink1Description: https://search.murata.co.jp/Ceramy/image/img/A01X/G101/ENG/GRM188R61E106KA73-01.pdf?src-supplier=Digi-Key; Supplier Part Number 1: 81-GRM188R61E106KA3D
footprint Cap0603
pins: 1, 2

## GRM0335C1H4R7BA01D
designator C?, comment 4.7pF
CAP CER 4.7PF 50V C0G/NP0 0201; Manufacturer: Murata; Manufacturer Part Number: GRM0335C1H4R7BA01D; Dielectric: C0G; Supplier 1: Digi-Key; RoHS: Yes; Category: Ceramic Capacitors; Stock 1: 1739; Pricing 1: 1=0.10000, 10=0.02000, 50=0.01100, 100=0.00900, 500=0.00644, 1000=0.00506, 2500=0.00460, 5000=0.00423 (USD); Mount: Surface Mount; Case/Package: 0201; Case Code (Imperial): 0201; Case Code (Metric): 0603; Min Operating Temperature: -55°C; Max Operating Temperature: 125°C; Capacitance: 4.7pF; Packaging: Tape and Reel; Voltage Rating: 50V; Package Quantity: 15000; Voltage Rating (DC): 50V; Termination: SMD/SMT; Series: GRM; Length: 0.024inch; Width: 0.012inch; Height: 0.3mm; Thickness: 0.013inch; Lead Free: Lead Free; RoHS Compliant: Yes; ComponentLink1URL: https://datasheet.ciiva.com/29538/partnumbering-e-01-29538525.pdf?src-supplier=Digi-Key; ComponentLink1Description: https://datasheet.ciiva.com/29538/partnumbering-e-01-29538525.pdf?src-supplier=Digi-Key; Supplier Part Number 1: 490-11332-1-ND
footprint CAP 0201
pins: 1, 2

## GRT188R61A226ME13D
designator C?, comment 22uF
Cap Ceramic Monolithic 22uF 10VDC 20% SMD Paper T/R; Manufacturer: Murata; Manufacturer Part Number: GRT188R61A226ME13D; Supplier 1: Avnet; RoHS: Yes; Pricing 1: 4000=0.10936, 8000=0.10684, 16000=0.10534, 24000=0.10233, 32000=0.10007 (USD); Supplier Part Number 1: GRT188R61A226ME13D
footprint Cap0603
pins: 1, 2

## Header 1x2
designator P?, comment 61300211121
CONN HEADER VERT 2POS 2.54MM; Manufacturer: Wurth Electronics; Current Rating: 3A; Voltage Rating: 250V; Number of Positions: 2; Gender: Male; Connector Type: Male Pin; Pitch: 0.1inch; Supplier 1: Digi-Key; Manufacturer Part Number: 61300211121; Stock 1: 219205; Pricing 1: 1=0.13, 10=0.106, 25=0.088, 50=0.074, 100=0.067, 1000=0.061 (USD); Mount: Through Hole; Contact Plating: Gold; Housing Material: PBT; Contact Material: Copper Alloy,Copper; Color: Black; Min Operating Temperature: -40°C; Max Operating Temperature: 125°C; Number of Rows: 1; Contact Gender: Male; Packaging: Bulk; Termination: Through Hole; Number of Contacts: 2; Contact Mating Length: 0.236inch; REACH SVHC: Unknown; Lead Free: Lead Free; ComponentLink1URL: http://www.mouser.com/ds/2/445/6130xx11121-538006.pdf?src-supplier=Mouser; ComponentLink1Description: http://www.mouser.com/ds/2/445/6130xx11121-538006.pdf?src-supplier=Mouser; Supplier Part Number 1: 732-5315-ND
footprint HDR1X2 (CONN HEADER VERT 2POS 2.54MM)
pins: 1, 2

## HLC021R6BTTR
designator L?, comment 1.6nH
FIXED IND 1.6NH 660MA 150 MOHM; Manufacturer: Kyocera AVX; Manufacturer Part Number: HLC021R6BTTR; Core Material: Non-Magnetic; DC Resistance (DCR): 150mR; Shielding: Unshielded; Self Resonant Frequency: 18GHz; Test Frequency: 450MHz; Q Factor: 25; Supplier 1: Digi-Key; Stock 1: 5000; Pricing 1: 1=0.41, 10=0.36, 25=0.3152, 50=0.2704, 100=0.2478, 250=0.22524, 500=0.21174, 1000=0.16218, 2500=0.15317 (USD); Mount: Surface Mount; Case/Package: 0402; Case Code (Metric): 1005; Case Code (Imperial): 0402; Min Operating Temperature: -55°C; Max Operating Temperature: 125°C; Inductance: 1.6nH; Max DC Current: 660mA; Packaging: Tape and Reel; Package Quantity: 5000; Current Rating: 660mA; Termination: SMD/SMT; Length: 1mm; Height: 0.35mm; Depth: 0.66mm; Width: 0.023inch; Height - Seated (Max): 0.018inch; Radiation Hardening: No; REACH SVHC: No SVHC; Lead Free: Lead Free; ComponentLink1URL: https://media.digikey.com/pdf/Data%20Sheets/AVX%20PDFs/MLO%20High%20Current%20Inductors.pdf?src-supplier=Digi-Key; ComponentLink1Description: https://media.digikey.com/pdf/Data%20Sheets/AVX%20PDFs/MLO%20High%20Current%20Inductors.pdf?src-supplier=Digi-Key; ComponentLink2URL: http://www.avx.com/docs/catalogs/mlohighcurrentinductor.pdf?src-supplier=Future+Electronics; ComponentLink2Description: http://www.avx.com/docs/catalogs/mlohighcurrentinductor.pdf?src-supplier=Future+Electronics; Supplier Part Number 1: 478-HLC021R6BTCT-ND
footprint Ind 0402
pins: 1, 2

## HTP-CON-M411H
designator J?
Straight 4 pin magnetic data connector, stably working, high quality magnetic connectors; Manufacturer: HYTEPRO; Value: Custom; Manufacturer Part No: HTP-CON-M411H; Package: Custom; ComponentLink1Description: Supplier Link; ComponentLink1URL: https://www.hyte.pro/product/m411h.html
footprint HTP-CON-M411H
pins: 1 VCC, 2 D-, 3 D+, 4 GND